# Altium footprint library 5V电源肖特基二极管_B560C-13-F.PcbLib: 1 footprints
Each footprint in its own frame and in the unit in brackets; x right, y up, seen from the top. Pads: shape width x height; smd on the part's side, far side on the other; paste and mask are expansions set on the pad; w line width, h text height; cw(c..) or ccw(c..) is an arc to the next point about the centre after c.
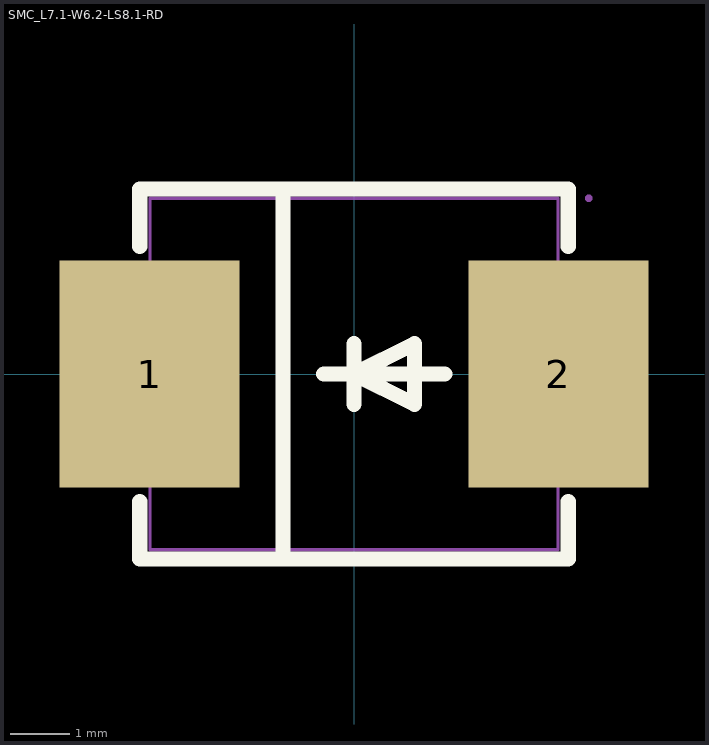
[diagram p0: the footprint, top view; thin cyan lines are the x and y axes]

## SMC_L7.1-W6.2-LS8.1-RD [mm]
pads (2):
  rect 3.03x3.82 smd: 1(-3.435,0) 2(3.435,0)
Top Overlay:
  lines w0.254: -3.6,-2.141 -3.6,-3.11 3.6,-3.11 3.6,-2.141 ; -3.6,2.141 -3.6,3.11 3.6,3.11 3.6,2.141 ; -1.192,-3.11 -1.192,3.11 ; -0.508,0 1.524,0 ; 0,0.508 0,-0.508 0,0 ; 0,0 1.016,0.508 1.016,-0.508 0,0
Mechanical 2:
  region: 2.54,0.254 4.318,0.254 4.318,-0.254 2.54,-0.254
  region: 3.181,-0.895 3.181,0.883 3.689,0.883 3.689,-0.895
  region: -4.33,0.254 -2.552,0.254 -2.552,-0.254 -4.33,-0.254
Mechanical 6:
  lines w0.051: -3.428,-2.952 -3.428,2.952 3.428,2.952 3.428,-2.952 -3.428,-2.952
Mechanical 8:
  region: 4.003,2.952 4.003,2.927 3.968,2.892 3.918,2.892 3.883,2.927 3.883,2.952 3.883,2.977 3.918,3.012 3.968,3.012 4.003,2.977 4.003,2.952
Mechanical 9:
  region: -2.928,-1.475 -3.943,-1.475 -3.943,1.475 -2.928,1.475
  region: 2.928,1.475 3.943,1.475 3.943,-1.475 2.928,-1.475